# Altium schematic symbol library Pad Header.SchLib: 1 symbol
Pins are listed as number, name and electrical type; pins without a type are passive.

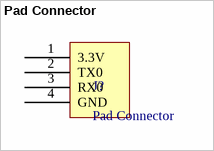
[diagram p0: symbol Pad Connector]

## Pad Connector
designator J?
footprint Pad Connector PCB
pins: 1 3.3V, 2 TX0, 3 RX0, 4 GND